# Altium schematic symbol library LFCG-490+.SchLib: 1 symbol
Pins are listed as number, name and electrical type; pins without a type are passive.

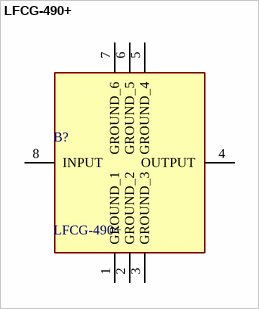
[diagram p0: symbol LFCG-490+]

## LFCG-490+
designator B?
Signal Conditioning LTCC Low Pass Filter, DC - 490 MHz, 50O; Manufacturer_Name: Mini-Circuits; Geometry.Height: 0.95mm; Mouser Part Number: 139-LFCG-490+; Mouser Price/Stock: https://www.mouser.co.uk/ProductDetail/Mini-Circuits/LFCG-490%2b?qs=vmHwEFxEFR%252BNH1d71kamjA%3D%3D; Manufacturer_Part_Number: LFCG-490+; Datasheet Link: https://www.minicircuits.com/pdfs/LFCG-490+.pdf
footprint LFCG490
pins: 1 GROUND_1, 2 GROUND_2, 3 GROUND_3, 4 OUTPUT, 5 GROUND_4, 6 GROUND_5, 7 GROUND_6, 8 INPUT